# Altium schematic symbol library Sensor.SchLib: 53 symbols
Pins are listed as number, name and electrical type; pins without a type are passive.

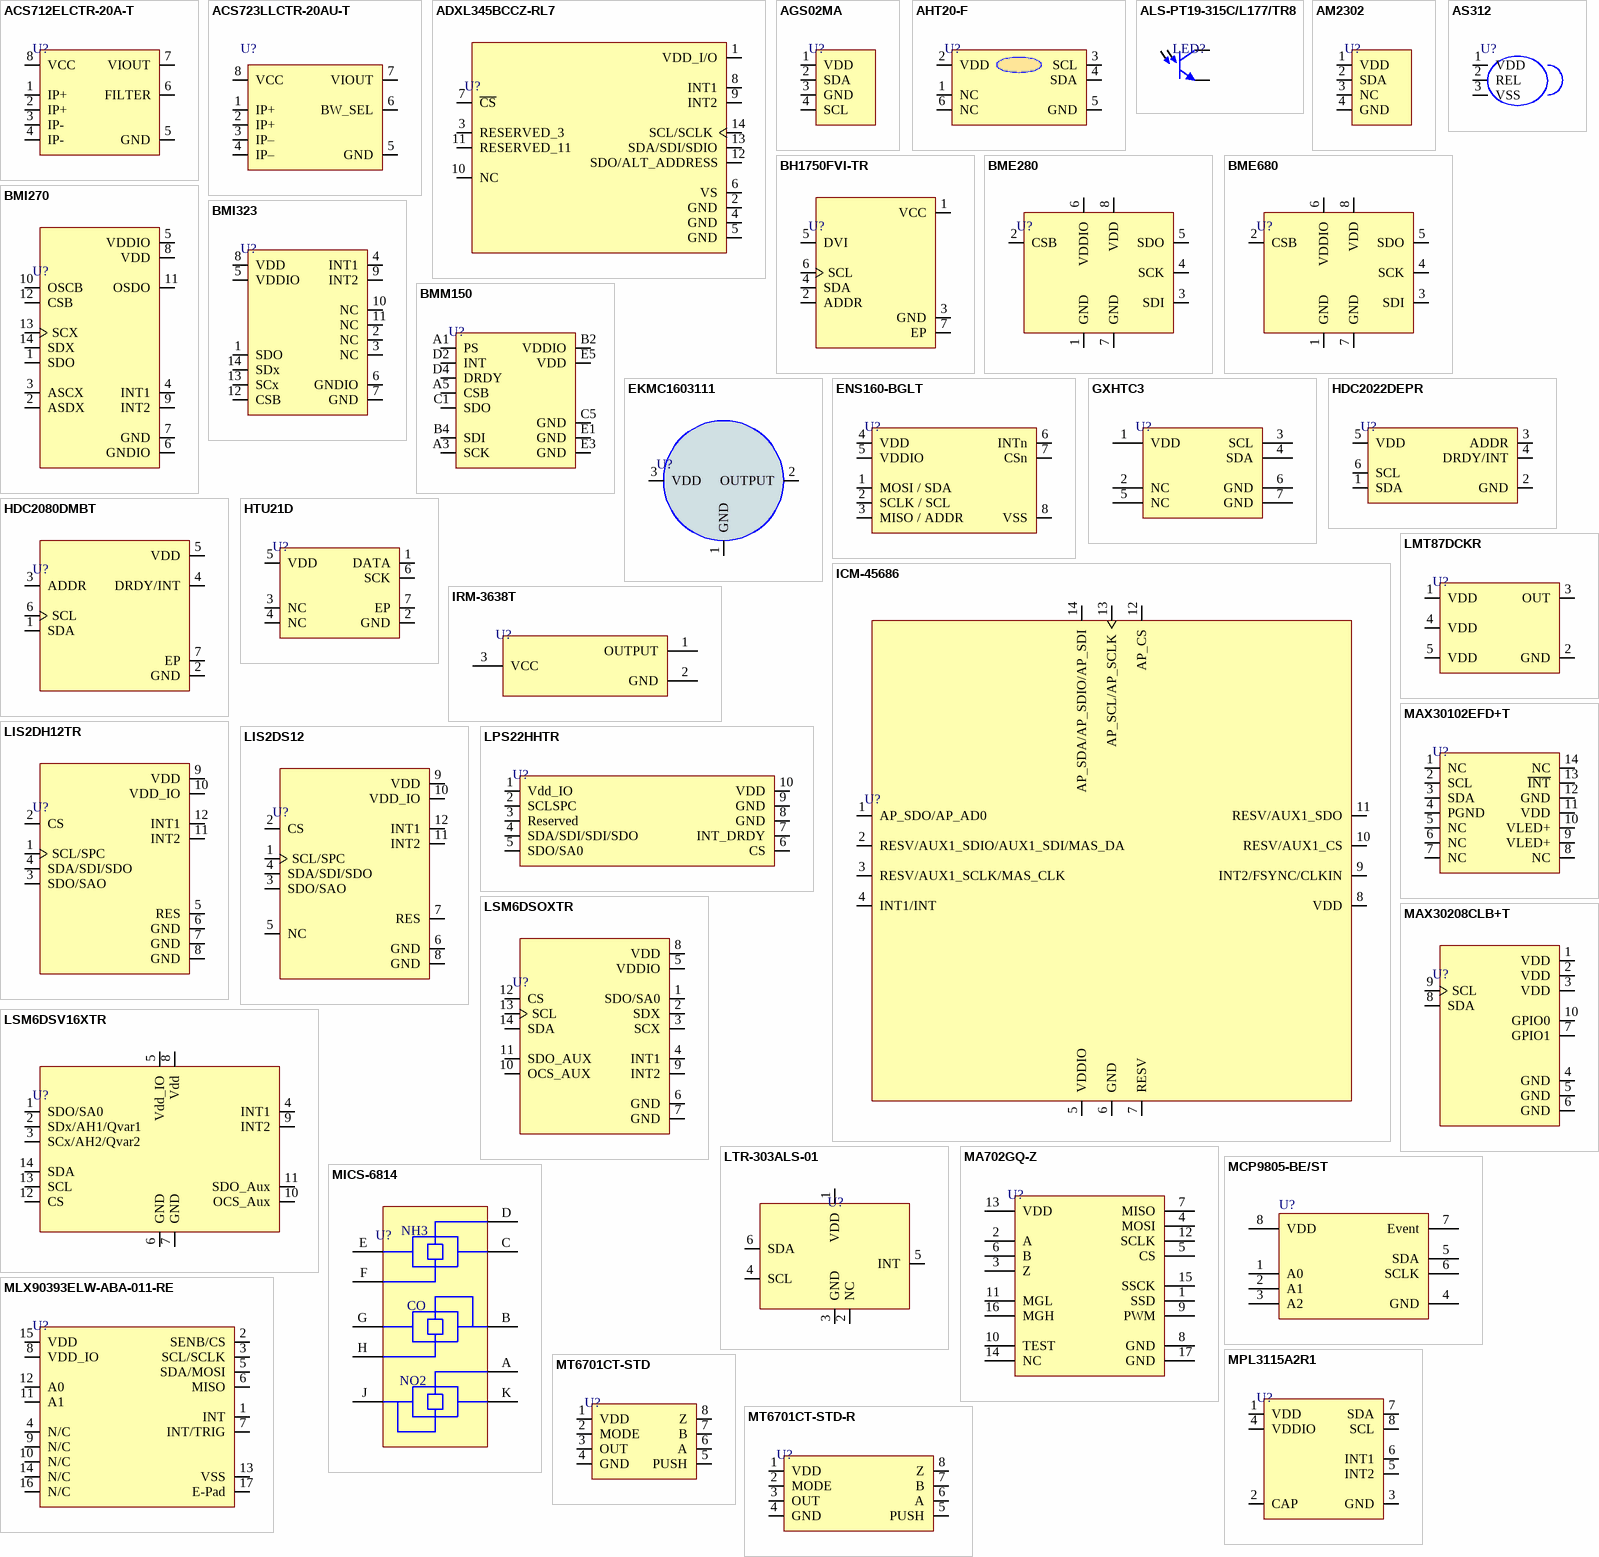
[diagram p0: symbols ACS712ELCTR-20A-T to MT6701CT-STD-R]

## ACS712ELCTR-20A-T
designator U?
SENSOR CURRENT HALL 20A AC/DC; Manufacturer: Allegro MicroSystems, LLC; Manufacturer Part Number: ACS712ELCTR-20A-T; Item Type: IC; Package: SOIC-8; LCSC Part Number: C10681; ComponentLink5URL: https://www.lcsc.com/product-detail/Current-Sensors_Allegro-MicroSystems-LLC-ACS712ELCTR-20A-T_C10681.html; ComponentLink5Description: LCSC
footprint SOIC-8
pins: 1 IP+, 2 IP+, 3 IP-, 4 IP-, 5 GND, 6 FILTER, 7 VIOUT, 8 VCC

## ACS723LLCTR-20AU-T
designator U?
SENSOR CURRENT HALL 20A DC; Manufacturer: Allegro MicroSystems, LLC; Manufacturer Part Number: ACS723LLCTR-20AU-T; Item Type: Current Sensor; Package: SOP-8; LCSC Part Number: C459324; ComponentLink4URL: https://www.lcsc.com/product-detail/Current-Sensors_Allegro-MicroSystems-span-style-background-color-ff0-LLC-span-ACS723LLCTR-20AU-T_C459324.html; ComponentLink4Description: LCSC
footprint SOP-8
pins: 1 IP+, 2 IP+, 3 IP–, 4 IP–, 5 GND, 6 BW_SEL, 7 VIOUT, 8 VCC

## ADXL345BCCZ-RL7
designator U?
ACCEL 2-16G I2C/SPI 14LGA; Manufacturer: Analog Devices; Manufacturer Part Number: ADXL345BCCZ-RL7; Item Type: Accelerometers; Supplier: Mouser; LCSC Part Number: C9667; RoHS: Yes; Stock: 17836; Pricing: 1=6.67, 10=5.76, 50=5.27, 100=5.09, 1000=4.59, 10000=4.59 (USD); ComponentLink1URL: https://datasheet.ciiva.com/15099/getdatasheetpartid-317342-15099703.pdf?src-supplier=Verical; ComponentLink1Description: https://datasheet.ciiva.com/15099/getdatasheetpartid-317342-15099703.pdf?src-supplier=Verical; ComponentLink2URL: https://datasheet.ciiva.com/3271/adxl345-ep-3271528.pdf?src-supplier=Avnet; ComponentLink2Description: https://datasheet.ciiva.com/3271/adxl345-ep-3271528.pdf?src-supplier=Avnet; ComponentLink3URL: https://datasheet.ciiva.com/2809/adxl345-2809853.pdf?src-supplier=Digikey; ComponentLink3Description: https://datasheet.ciiva.com/2809/adxl345-2809853.pdf?src-supplier=Digikey; ComponentLink4URL: https://datasheet.ciiva.com/2809/adxl345-2809854.pdf?src-supplier=Digikey; ComponentLink4Description: https://datasheet.ciiva.com/2809/adxl345-2809854.pdf?src-supplier=Digikey; ComponentLink5URL: https://datasheet.ciiva.com/2809/adxl345-2809855.pdf?src-supplier=Digikey; ComponentLink5Description: https://datasheet.ciiva.com/2809/adxl345-2809855.pdf?src-supplier=Digikey; ComponentLink6URL: https://datasheet.ciiva.com/3271/adxl345-ep-3271595.pdf?src-supplier=Avnet; ComponentLink6Description: https://datasheet.ciiva.com/3271/adxl345-ep-3271595.pdf?src-supplier=Avnet
footprint 14-LGA (3x5)
pins: 1 VDD_I/O, 2 GND, 3 RESERVED_3, 4 GND, 5 GND, 6 VS, 7 ~{CS}, 8 INT1, 9 INT2, 10 NC, 11 RESERVED_11, 12 SDO/ALT_ADDRESS, 13 SDA/SDI/SDIO, 14 SCL/SCLK

## AGS02MA
designator U?
SIP-4 Gas Sensors ROHS; Manufacturer: Aosong (Guangzhou) Elec; Manufacturer Part Number: AGS02MA; Item Type: Sensor; Package: SIP-4; LCSC Part Number: C3012633; ComponentLink1Description: LCSC; ComponentLink1URL: https://lcsc.com/product-detail/Gas-Sensors_Aosong-Guangzhou-Elec-AGS02MA_C3012633.html?s_z=n_AGS02MA%2520
footprint AGS02MA
pins: 1 VDD, 2 SDA, 3 GND, 4 SCL

## AHT20-F
designator U?
SMD-6P,3x3mm Temperature and Humidity Sensor ROHS; Manufacturer: Aosong (Guangzhou) Elec; Manufacturer Part Number: AHT20-F; Item Type: IC; Package: SMD-6P,3x3mm; LCSC Part Number: C3012622; ComponentLink1Description: LCSC; ComponentLink1URL: https://www.lcsc.com/product-detail/Temperature-and-Humidity-Sensor_Aosong-Guangzhou-Elec-AHT20-F_C3012622.html
footprint AHT20-F
pins: 1 NC, 2 VDD, 3 SCL, 4 SDA, 5 GND, 6 NC

## ALS-PT19-315C/L177/TR8
designator LED?
SENSOR PHOTO 630NM 2SMD; Manufacturer: Everlight; Manufacturer Part Number: ALS-PT19-315C/L177/TR8; Rise Time: 0.11ms; Fall Time: 0.22ms; Lens Style: Flat; Collector Emitter Breakdown Voltage: 5.5V; Polarity: NPN; Number of Elements: 1; Dark Current: 100nA; Item Type: Photo Sensor; Supplier 1: Digi-Key; RoHS: Yes; Category: Sensors; Stock 1: 41849; Pricing 1: 1=0.46000, 5=0.41800, 10=0.37100, 25=0.33200, 50=0.29180, 100=0.24880, 500=0.20576, 1000=0.17226 (USD); Mount: Surface Mount; Case/Package: SMD/SMT; Number of Pins: 2; Min Operating Temperature: -40°C; Max Operating Temperature: 85°C; Wavelength: 630nm; Packaging: Tape and Reel; Package Quantity: 1; Max Breakdown Voltage: 5.5V; Radiation Hardening: No; RoHS Compliant: Yes; ComponentLink1URL: https://datasheet.ciiva.com/12092/als-pt19-315c-l177-tr-datasheet-34741-12092024.pdf?src-supplier=Mouser; ComponentLink1Description: https://datasheet.ciiva.com/12092/als-pt19-315c-l177-tr-datasheet-34741-12092024.pdf?src-supplier=Mouser; ComponentLink2URL: https://datasheet.ciiva.com/4270/alspt19315cl177-tr8-1810-4270796.pdf?src-supplier=Arrow+Electronics; ComponentLink2Description: https://datasheet.ciiva.com/4270/alspt19315cl177-tr8-1810-4270796.pdf?src-supplier=Arrow+Electronics; Supplier Part Number 1: 1080-1244-1-ND; LCSC Part Number: C146233
footprint ALS-PT19-315C/L177/TR_
pins: 1 C, 2 E

## AM2302
designator U?
SIP-4 Temperature and Humidity Sensor ROHS; Manufacturer: Aosong (Guangzhou) Elec; Manufacturer Part Number: AM2302; Package: SIP-4; LCSC Part Number: C83988; Item Type: Sensor; ComponentLink1Description: LCSC; ComponentLink1URL: https://lcsc.com/product-detail/Temperature-and-Humidity-Sensor_Aosong-Guangzhou-Elec-AM2302_C83988.html?s_z=n_am2302
footprint AM2302
pins: 1 VDD, 2 SDA, 3 NC, 4 GND

## AS312
designator U?
Plugin Human Body Sensing Sensor ROHS; Manufacturer: Senba Sensing Tech; Manufacturer Part Number: AS312; Package: Plugin; LCSC Part Number: C90465; Item Type: Sensor; ComponentLink1Description: LCSC; ComponentLink1URL: https://lcsc.com/product-detail/Biometric-Sensors_Senba-Sensing-Tech-AS312_C90465.html
footprint AS312
pins: 1 VDD, 2 REL, 3 VSS

## BH1750FVI-TR
designator U?
SENSOR OPT 560NM AMBIENT 6WSOF; Manufacturer: Rohm; Manufacturer Part Number: BH1750FVI-TR; Item Type: IC; Min Supply Voltage: 2.7V; Max Supply Voltage: 3.6V; Interface: I2C,Serial; Max Power Dissipation: 260mW; Output Type: I2C,Digital,DIGITAL OUTPUT; Operating Supply Current: 120uA; Supplier: Digikey; LCSC Part Number: C78960; RoHS: Yes; Stock: 3772; Pricing: 1=3.29, 5=2.934, 10=2.804, 25=2.648, 50=2.542, 100=2.4447, 500=2.24896, 1000=2.18484 (USD); Mounting Technology: Surface Mount; Case/Package: SMD/SMT; Pins: 6; Contact Plating: Copper,Tin; Min Operating Temperature: -40°C; Max Operating Temperature: 85°C; Packaging: Tape and Reel; Package Quantity: 3000; Type: Integrated Circuit (IC); Wavelength: 560nm; Series: -; Length: 3mm; Width: 1.8mm; Height: 0.75mm; Lead Free: Lead Free; RoHS Compliant: Yes; Reach SVHC Compliant: Unknown; ComponentLink1URL: https://datasheet.ciiva.com/4697/bh1750fvi-e-186247-4697237.pdf?src-supplier=Mouser; ComponentLink1Description: https://datasheet.ciiva.com/4697/bh1750fvi-e-186247-4697237.pdf?src-supplier=Mouser; ComponentLink2URL: https://datasheet.ciiva.com/15098/getdatasheetpartid-451213-15098956.pdf?src-supplier=Verical; ComponentLink2Description: https://datasheet.ciiva.com/15098/getdatasheetpartid-451213-15098956.pdf?src-supplier=Verical; ComponentLink3URL: https://datasheet.ciiva.com/2819/bh1750fvi-e-2819308.pdf?src-supplier=Digikey; ComponentLink3Description: https://datasheet.ciiva.com/2819/bh1750fvi-e-2819308.pdf?src-supplier=Digikey; ComponentLink4URL: https://datasheet.ciiva.com/2819/bh1750fvi-e-2819309.pdf?src-supplier=Digikey; ComponentLink4Description: https://datasheet.ciiva.com/2819/bh1750fvi-e-2819309.pdf?src-supplier=Digikey; ComponentLink5URL: https://datasheet.ciiva.com/2819/bh1750fvi-e-2819310.pdf?src-supplier=Digikey; ComponentLink5Description: https://datasheet.ciiva.com/2819/bh1750fvi-e-2819310.pdf?src-supplier=Digikey
footprint 6-WSOF
pins: 1 VCC, 2 ADDR, 3 GND, 4 SDA, 5 DVI, 6 SCL, 7 EP

## BME280
designator U?
SENSOR PRESSURE HUMIDITY TEMP; Manufacturer: Bosch; Manufacturer Part Number: BME280; Item Type: Tem and Humidity Sensor; Supplier: Future Electronics; Supplier Part Number: 2053946; RoHS: No; Category: Temperature and Humidity Sensors; Stock: 9052; Pricing: 1=4.74, 20=4.31, 150=4.02, 1000=3.75, 5000=3.53 (USD); ComponentLink1URL: https://ae-bst.resource.bosch.com/media/_tech/media/product_flyer/BME280_Productflyer_BST_20170109.pdf?src-supplier=Arrow+Electronics; ComponentLink1Description: https://ae-bst.resource.bosch.com/media/_tech/media/product_flyer/BME280_Productflyer_BST_20170109.pdf?src-supplier=Arrow+Electronics; ComponentLink2URL: https://ae-bst.resource.bosch.com/media/_tech/media/datasheets/BST-BME280-DS002.pdf?src-supplier=Digi-Key; ComponentLink2Description: https://ae-bst.resource.bosch.com/media/_tech/media/datasheets/BST-BME280-DS002.pdf?src-supplier=Digi-Key; ComponentLink3URL: https://ae-bst.resource.bosch.com/media/_tech/media/product_flyer/BME280_Productflyer_BST_20170109.pdf?src-supplier=Mouser; ComponentLink3Description: https://ae-bst.resource.bosch.com/media/_tech/media/product_flyer/BME280_Productflyer_BST_20170109.pdf?src-supplier=Mouser; ComponentLink4URL: https://ae-bst.resource.bosch.com/media/_tech/media/product_flyer/BME280_Productflyer_BST_20170109.pdf?src-supplier=NAC+Semi; ComponentLink4Description: https://ae-bst.resource.bosch.com/media/_tech/media/product_flyer/BME280_Productflyer_BST_20170109.pdf?src-supplier=NAC+Semi; ComponentLink5URL: https://datasheet.octopart.com/BME280-Bosch-Sensortec-datasheet-119732019.pdf?src-supplier=LKR; ComponentLink5Description: https://datasheet.octopart.com/BME280-Bosch-Sensortec-datasheet-119732019.pdf?src-supplier=LKR; LCSC Part Number: C92489
footprint BME280
pins: 1 GND, 2 CSB, 3 SDI, 4 SCK, 5 SDO, 6 VDDIO, 7 GND, 8 VDD

## BME680
designator U?
SENSOR RH PRESSURE TEMP VOC; Manufacturer: Bosch Sensortec; Manufacturer Part Number: BME680; Sensor Type: Temperature; Output Type: SPI,I2C; Item Type: Temperature Sensor; Supplier 1: Future Electronics; RoHS: No; Category: Uncategorized; Stock 1: 64; Pricing 1: 1=9.84000, 20=8.81000, 125=8.18000, 500=7.71000, 3000=7.09000 (USD); Min Operating Temperature: -40°C; Max Operating Temperature: 85°C; ComponentLink1URL: https://ae-bst.resource.bosch.com/media/_tech/media/application_notes/BST-BME680-HS000-05.pdf?src-supplier=Digi-Key; ComponentLink1Description: https://ae-bst.resource.bosch.com/media/_tech/media/application_notes/BST-BME680-HS000-05.pdf?src-supplier=Digi-Key; ComponentLink2URL: https://ae-bst.resource.bosch.com/media/_tech/media/product_flyer/BST-BME680-FL000.pdf?src-supplier=Digi-Key; ComponentLink2Description: https://ae-bst.resource.bosch.com/media/_tech/media/product_flyer/BST-BME680-FL000.pdf?src-supplier=Digi-Key; Supplier Part Number 1: 7107186; LCSC Part Number: C125972
footprint BME680
pins: 1 GND, 2 CSB, 3 SDI, 4 SCK, 5 SDO, 6 VDDIO, 7 GND, 8 VDD

## BMI270
designator U?
IMU ACCEL/GYRO I2C/SPI 14LGA; Manufacturer: Bosch Sensortec; Manufacturer Part Number: BMI270; Item Type: Sensor; Supplier: Future Electronics; LCSC Part Number: C2836813; RoHS: No; Stock: 5000; Pricing: 1=4.43, 20=4, 100=3.77, 500=3.54, 2500=3.31 (USD)
footprint 14-LGA (2.5x3)
pins: 1 SDO, 2 ASDX, 3 ASCX, 4 INT1, 5 VDDIO, 6 GNDIO, 7 GND, 8 VDD, 9 INT2, 10 OSCB, 11 OSDO, 12 CSB, 13 SCX, 14 SDX

## BMI323
designator U?
IMU ACCEL/GYRO I2C/SPI 14LGA; Manufacturer: Bosch Sensortec; Manufacturer Part Number: BMI323; Item Type: IC; Supplier: Future Electronics; Supplier Part Number: 1168362; RoHS: No; Category: Uncategorized; LCSC Part Number: C5368700
footprint 14-LGA (2.5x3)
pins: 1 SDO, 2 NC, 3 NC, 4 INT1, 5 VDDIO, 6 GNDIO, 7 GND, 8 VDD, 9 INT2, 10 NC, 11 NC, 12 CSB, 13 SCx, 14 SDx

## BMM150
designator U?
SENSOR FLIPCORE/HALL SPI 12WLCSP; Manufacturer: Bosch Sensortec; Manufacturer Part Number: BMM150; Item Type: Magnetic Sensors; Supplier: Rs; Supplier Part Number: 2457371; RoHS: Yes; Category: Magnetic Sensors; Stock: 780; Pricing: 5=1.686, 25=1.598, 100=1.49, 500=1.37, 1000=1.262 (GBP); ComponentLink1URL: https://datasheet.ciiva.com/18575/bst-bmm150-ds001-01-18575453.pdf?src-supplier=Digi-Key; ComponentLink1Description: https://datasheet.ciiva.com/18575/bst-bmm150-ds001-01-18575453.pdf?src-supplier=Digi-Key; LCSC Part Number: C171681
footprint 12-WLCSP (1.56x1.56)
pins: A1 PS, A3 SCK, A5 CSB, B2 VDDIO, B4 SDI, C1 SDO, C5 GND, D2 INT, D4 DRDY, E1 GND, E3 GND, E5 VDD

## EKMC1603111
designator U?
PaPIRs MOTION SENSOR VZ series 170uA (White) 12m detection range; Manufacturer: Panasonic; Manufacturer Part Number: EKMC1603111; Supplier: Rs; Supplier Part Number: 1357081; RoHS: Yes; Category: Motion Sensors; Stock: 74; Pricing: 50=6.546, 250=5.46, 500=5.32 (GBP); ComponentLink1URL: https://datasheet.ciiva.com/1314/1537854-1314441.pdf?src-supplier=Element14; ComponentLink1Description: https://datasheet.ciiva.com/1314/1537854-1314441.pdf?src-supplier=Element14; ComponentLink2URL: https://datasheet.ciiva.com/1314/1537854-1314623.pdf?src-supplier=Element14; ComponentLink2Description: https://datasheet.ciiva.com/1314/1537854-1314623.pdf?src-supplier=Element14; ComponentLink3URL: https://datasheet.ciiva.com/24392/papirs-ekmc-catalog-24392999.pdf?src-supplier=Onlinecomponents.com; ComponentLink3Description: https://datasheet.ciiva.com/24392/papirs-ekmc-catalog-24392999.pdf?src-supplier=Onlinecomponents.com
footprint EKMC1603111
pins: 1 GND (power), 2 OUTPUT (oc), 3 VDD (power)

## ENS160-BGLT
designator U?
Digital Metal-Oxide Multi-Gas Sensor; Manufacturer: ScioSense; Manufacturer Part Number: ENS160-BGLT; Supplier 1: Mouser; RoHS: No; Category: Uncategorized; Stock 1: 5978; Pricing 1: 1=12.8, 10=10.46, 50=9.67, 100=8.1, 1000=7.19, 10000=7.19 (USD); Supplier Part Number 1: 135-ENS160-BGLT; LCSC Part Number: C3659333; Item Type: Gas Sensor
footprint ENS160-BGLT
pins: 1 MOSI / SDA, 2 SCLK / SCL, 3 MISO / ADDR, 4 VDD, 5 VDDIO, 6 INTn, 7 CSn, 8 VSS

## GXHTC3
designator U?
DFN-6-EP(2x2) Temperature and Humidity Sensor ROHS; Manufacturer: GXCAS; Manufacturer Part Number: GXHTC3; Item Type: Temperature & Humidity Sensor; Package: DFN-6-EP(2x2); LCSC Part Number: C2837688; ComponentLink1Description: LCSC; ComponentLink1URL: https://www.lcsc.com/product-detail/Temperature-and-Humidity-Sensor_GXCAS-GXHTC3_C2837688.html
footprint DFN-6-EP(2x2)
pins: 1 VDD, 2 NC, 3 SCL, 4 SDA, 5 NC, 6 GND, 7 GND

## HDC2022DEPR
designator U?
SENSOR MULT HUMIDITY/TEMP; Manufacturer: Texas Instruments; Manufacturer Part Number: HDC2022DEPR; Item Type: Multifunction Sensor; Supplier: Mouser; Supplier Part Number: 595-HDC2022DEPR; RoHS: Yes; Category: Integrated Circuits (ICs); Stock: 5312; Pricing: 1=4.2, 10=2.66, 50=2.66, 100=2.58, 1000=2.02, 10000=1.94 (USD)
footprint HDC2022DEPR
pins: 1 SDA, 2 GND, 3 ADDR, 4 DRDY/INT, 5 VDD, 6 SCL

## HDC2080DMBT
designator U?
HUMIDITY SENSOR; Manufacturer: Texas Instruments; Manufacturer Part Number: HDC2080DMBT; Item Type: Temperature and Humidity Sensor; Supplier: Mouser; Supplier Part Number: 595-HDC2080DMBT; RoHS: Yes; Category: Integrated Circuits (ICs); Stock: 8942; Pricing: 1=4.78, 10=3.59, 50=3.59, 100=2.92, 1000=2.28, 10000=2.21 (USD); ComponentLink1URL: http://www.ti.com/general/docs/suppproductinfo.tsp?distId=10&amp;gotoUrl=http%3A%2F%2Fwww.ti.com%2Flit%2Fgpn%2Fhdc2080&src-supplier=Digi-Key; ComponentLink1Description: http://www.ti.com/general/docs/suppproductinfo.tsp?distId=10&amp;gotoUrl=http%3A%2F%2Fwww.ti.com%2Flit%2Fgpn%2Fhdc2080&src-supplier=Digi-Key; ComponentLink2URL: http://www.ti.com/lit/ds/symlink/hdc2080.pdf?src-supplier=Digi-Key; ComponentLink2Description: http://www.ti.com/lit/ds/symlink/hdc2080.pdf?src-supplier=Digi-Key; LCSC Part Number: C266121
footprint HDC2080DMBT (DFN-6(3x3))
pins: 1 SDA, 2 GND, 3 ADDR, 4 DRDY/INT, 5 VDD, 6 SCL, 7 EP

## HTU21D
designator U?
DFN-6-EP(3x3) Temperature and Humidity Sensor ROHS; Manufacturer: TE Connectivity; Manufacturer Part Number: HTU21D; Item Type: IC; Supplier: Mouser; Supplier Part Number: 824-HTU21D; RoHS: Yes; Category: Temperature and Humidity Sensors; Stock: 15840; Pricing: 1=8.23, 10=5.36, 50=5.36, 100=4.48, 400=3.75, 800=3.5, 1000=3.5, 2400=3.38, 4800=3.26, 10000=3.21, 24800=3.14 (USD); ComponentLink1URL: http://www.farnell.com/datasheets/2207166.pdf?src-supplier=Farnell; ComponentLink1Description: http://www.farnell.com/datasheets/2207166.pdf?src-supplier=Farnell; ComponentLink2URL: https://datasheet.octopart.com/HTU21D-TE-Connectivity-datasheet-22149496.pdf?src-supplier=Farnell; ComponentLink2Description: https://datasheet.octopart.com/HTU21D-TE-Connectivity-datasheet-22149496.pdf?src-supplier=Farnell; ComponentLink3URL: https://datasheet.octopart.com/HTU21D-TE-Connectivity-datasheet-65793082.pdf?src-supplier=Element14; ComponentLink3Description: https://datasheet.octopart.com/HTU21D-TE-Connectivity-datasheet-65793082.pdf?src-supplier=Element14; ComponentLink4URL: https://datasheet.octopart.com/HTU21D-TE-Connectivity-datasheet-41524056.pdf?src-supplier=Newark; ComponentLink4Description: https://datasheet.octopart.com/HTU21D-TE-Connectivity-datasheet-41524056.pdf?src-supplier=Newark; LCSC Part Number: C83479
footprint DFN-6-EP(3x3)
pins: 1 DATA, 2 GND, 3 NC, 4 NC, 5 VDD, 6 SCK, 7 EP

## ICM-45686
designator U?
6 AXIS MEMES SENSOR; Manufacturer: TDK InvenSense; Manufacturer Part Number: ICM-45686; Item Type: IC; Supplier: Digikey; LCSC Part Number: C22459454; RoHS: No; Stock: 19377; Pricing: 1=5.86, 5=5.27, 10=5.052, 25=4.7908, 50=4.6122, 100=4.4484, 500=4.11884, 1000=3.99605 (USD)
footprint LGA-14(3x2.5)
pins: 1 AP_SDO/AP_AD0, 2 RESV/AUX1_SDIO/AUX1_SDI/MAS_DA, 3 RESV/AUX1_SCLK/MAS_CLK, 4 INT1/INT, 5 VDDIO, 6 GND, 7 RESV, 8 VDD, 9 INT2/FSYNC/CLKIN, 10 RESV/AUX1_CS, 11 RESV/AUX1_SDO, 12 AP_CS, 13 AP_SCL/AP_SCLK, 14 AP_SDA/AP_SDIO/AP_SDI

## IRM-3638T
designator U?
SENSOR REMOTE REC 38.0KHZ 14M; Manufacturer: Everlight; Manufacturer Part Number: IRM-3638T; Operating Supply Current: 1mA; Min Output Voltage: 2.7V; Operating Supply Voltage: 5.5V; Item Type: Optical Sensor; Supplier 1: Future Electronics; RoHS: Yes; Category: Optical Sensors; Pricing 1: 250=0.20500, 1500=0.19700, 5000=0.19000, 10000=0.18600, 20000=0.18000 (USD); Mount: Through Hole; Case/Package: Module; Number of Pins: 3; Min Operating Temperature: -25°C; Max Operating Temperature: 80°C; Package Quantity: 250; Series: -; Sensing Distance: 14m; Orientation: Side View; RoHS Compliant: Yes; ComponentLink1URL: https://datasheet.ciiva.com/12418/irm-3636t-27149-12418050.pdf?src-supplier=Mouser; ComponentLink1Description: https://datasheet.ciiva.com/12418/irm-3636t-27149-12418050.pdf?src-supplier=Mouser; ComponentLink2URL: https://datasheet.ciiva.com/2821/irm-36xxt-series-2821351.pdf?src-supplier=Digi-Key; ComponentLink2Description: https://datasheet.ciiva.com/2821/irm-36xxt-series-2821351.pdf?src-supplier=Digi-Key; LCSC Part Number: C16216; Supplier Part Number 1: 2052908
footprint SIP-3P-2.54mm
pins: 1 OUTPUT, 2 GND, 3 VCC

## LIS2DH12TR
designator U?
ACCEL 2-16G I2C/SPI 12LGA; Manufacturer: STMicroelectronics; Manufacturer Part Number: LIS2DH12TR; Item Type: Sensor; Operating Supply Voltage: 2.5V; Supplier: Future Electronics; LCSC Part Number: C110926; RoHS: Yes; Stock: 64000; Pricing: 8000=0.9 (USD); Lead Free: 5697LeadFree; ComponentLink1URL: https://datasheet.ciiva.com/46423/1836729-46423946.pdf?src-supplier=Element14; ComponentLink1Description: https://datasheet.ciiva.com/46423/1836729-46423946.pdf?src-supplier=Element14
footprint 12-LGA (2x2)
pins: 1 SCL/SPC, 2 CS, 3 SDO/SAO, 4 SDA/SDI/SDO, 5 RES, 6 GND, 7 GND, 8 GND, 9 VDD, 10 VDD_IO, 11 INT2, 12 INT1

## LIS2DS12
designator U?
ACCEL 2-16G I2C/SPI 12LGA; Manufacturer: STMicroelectronics; Manufacturer Part Number: LIS2DS12; Item Type: Accelerometers; Supplier: Avnet; LCSC Part Number: C5337244; RoHS: Yes; Stock: 1431; Pricing: 1=1.9, 10=1.61, 100=1.29, 500=1.2, 1000=1.07 (USD); ComponentLink1URL: http://www.farnell.com/datasheets/2028148.pdf?src-supplier=Farnell; ComponentLink1Description: http://www.farnell.com/datasheets/2028148.pdf?src-supplier=Farnell; ComponentLink2URL: https://datasheet.octopart.com/LIS2DS12-STMicroelectronics-datasheet-62333086.pdf?src-supplier=Element14; ComponentLink2Description: https://datasheet.octopart.com/LIS2DS12-STMicroelectronics-datasheet-62333086.pdf?src-supplier=Element14; ComponentLink3URL: http://www.farnell.com/datasheets/2028148.pdf?src-supplier=Newark; ComponentLink3Description: http://www.farnell.com/datasheets/2028148.pdf?src-supplier=Newark
footprint 12-LGA (2x2)
pins: 1 SCL/SPC, 2 CS, 3 SDO/SAO, 4 SDA/SDI/SDO, 5 NC, 6 GND, 7 RES, 8 GND, 9 VDD, 10 VDD_IO, 11 INT2, 12 INT1

## LMT87DCKR
designator U?
SENSOR ANALOG -50C-150C SC70-5; Manufacturer: Texas Instruments; Manufacturer Part Number: LMT87DCKR; Item Type: IC; Supplier: Mouser; LCSC Part Number: C962065; RoHS: Yes; Stock: 11565; Pricing: 1=0.5, 10=0.389, 50=0.389, 100=0.36, 1000=0.278, 10000=0.205 (USD); ComponentLink1URL: https://datasheet.ciiva.com/15098/getdatasheetpartid-716720-15098830.pdf?src-supplier=Verical; ComponentLink1Description: https://datasheet.ciiva.com/15098/getdatasheetpartid-716720-15098830.pdf?src-supplier=Verical; ComponentLink2URL: https://datasheet.ciiva.com/18575/lmt87-18575334.pdf?src-supplier=Digikey; ComponentLink2Description: https://datasheet.ciiva.com/18575/lmt87-18575334.pdf?src-supplier=Digikey
footprint SC70-5
pins: 1 VDD, 2 GND, 3 OUT, 4 VDD, 5 VDD

## LPS22HHTR
designator U?
SENSOR 18.27PSIA 24BIT 10HLGA; Manufacturer: STMicroelectronics; Manufacturer Part Number: LPS22HHTR; Item Type: Pressure Sensors; Output Type: SPI,I2C; Pressure Type: Absolute; Port Style: No Port; Max Pressure: 290PSI; Max Supply Voltage: 3.7V; Min Supply Voltage: 1.7V; Supplier: Mouser; LCSC Part Number: C2827824; RoHS: Yes; Stock: 8715; Pricing: 1=2.49, 10=2, 50=1.91, 100=1.84, 1000=1.63, 10000=1.49 (USD); Case/Package: HLGA; Pins: 10; Min Operating Temperature: -40°C; Max Operating Temperature: 85°C; Termination: SMD/SMT; Series: -; Packaging: Cut Tape; Operating Pressure: 18.27PSI; Height: 800um; RoHS Compliant: Yes; ComponentLink1URL: http://www.farnell.com/datasheets/2710908.pdf?src-supplier=Farnell; ComponentLink1Description: http://www.farnell.com/datasheets/2710908.pdf?src-supplier=Farnell; ComponentLink2URL: http://www.farnell.com/datasheets/2710908.pdf?src-supplier=Newark; ComponentLink2Description: http://www.farnell.com/datasheets/2710908.pdf?src-supplier=Newark; ComponentLink3URL: https://www.st.com/resource/en/datasheet/lps22hh.pdf?src-supplier=Digikey; ComponentLink3Description: https://www.st.com/resource/en/datasheet/lps22hh.pdf?src-supplier=Digikey; ComponentLink4URL: https://www.st.com/resource/en/data_brief/lps22hh.pdf?src-supplier=Digikey; ComponentLink4Description: https://www.st.com/resource/en/data_brief/lps22hh.pdf?src-supplier=Digikey
footprint HLGA-10(2x2)
pins: 1 Vdd_IO, 2 SCLSPC, 3 Reserved, 4 SDA/SDI/SDI/SDO, 5 SDO/SA0, 6 CS, 7 INT_DRDY, 8 GND, 9 GND, 10 VDD

## LSM6DSOXTR
designator U?
INEMO INERTIAL MODULE: 3D ACCELE; Manufacturer: STMicroelectronics; Manufacturer Part Number: LSM6DSOXTR; Item Type: IC; Sensor Type: Accelerometer,Gyroscope,6 Axis; Output Type: SPI,I2C; Max Supply Voltage: 3.6V; Min Supply Voltage: 1.62V; Operating Supply Current: 550uA; Operating Supply Voltage: 1.8V; Supplier: Mouser; LCSC Part Number: C481766; RoHS: Yes; Stock: 1151; Pricing: 1=4.21, 10=3.61, 50=3.28, 100=3.16, 1000=2.84, 10000=2.64 (USD); Mounting Technology: Surface Mount; Case/Package: LGA; Min Operating Temperature: -40°C; Max Operating Temperature: 85°C; Series: iNEMO; Packaging: Cut Tape; Height: 860um; ComponentLink1URL: http://www.farnell.com/datasheets/2736724.pdf?src-supplier=Farnell; ComponentLink1Description: http://www.farnell.com/datasheets/2736724.pdf?src-supplier=Farnell; ComponentLink2URL: https://www.st.com/resource/en/datasheet/lsm6dsox.pdf?src-supplier=Digikey; ComponentLink2Description: https://www.st.com/resource/en/datasheet/lsm6dsox.pdf?src-supplier=Digikey; ComponentLink3URL: http://www.farnell.com/datasheets/2736724.pdf?src-supplier=Element14; ComponentLink3Description: http://www.farnell.com/datasheets/2736724.pdf?src-supplier=Element14; ComponentLink4URL: http://www.farnell.com/datasheets/2736724.pdf?src-supplier=Newark; ComponentLink4Description: http://www.farnell.com/datasheets/2736724.pdf?src-supplier=Newark
footprint 14-LGA (2.5x3)
pins: 1 SDO/SA0, 2 SDX, 3 SCX, 4 INT1, 5 VDDIO, 6 GND, 7 GND, 8 VDD, 9 INT2, 10 OCS_AUX, 11 SDO_AUX, 12 CS, 13 SCL, 14 SDA

## LSM6DSV16XTR
designator U?
INEMO 3D ACCELEROMETER AND 3D GY; Manufacturer: STMicroelectronics; Manufacturer Part Number: LSM6DSV16XTR; Item Type: IC; Max Supply Voltage: 3.6V; Min Supply Voltage: 1.71V; Supplier: Arrow Electronics; LCSC Part Number: C5267406; RoHS: No; Stock: 5000; Pricing: 5000=2.815 (USD); Min Operating Temperature: -40°C; Max Operating Temperature: 85°C; Height: 860um
footprint 14-LGA (2.5x3)
pins: 1 SDO/SA0, 2 SDx/AH1/Qvar1, 3 SCx/AH2/Qvar2, 4 INT1, 5 Vdd_IO, 6 GND, 7 GND, 8 Vdd, 9 INT2, 10 OCS_Aux, 11 SDO_Aux, 12 CS, 13 SCL, 14 SDA

## LTR-303ALS-01
designator U?
SENSOR OPT AMBIENT 6DFN; Manufacturer: Vishay Lite-On; Manufacturer Part Number: LTR-303ALS-01; Output Type: I2C; Item Type: Ambient Light Sensor; Supplier 1: Arrow Electronics; RoHS: Yes; Category: Uncategorized; Stock 1: 1717; Pricing 1: 1=0.5742, 10=0.465, 25=0.4604, 100=0.394, 250=0.39, 500=0.3741, 1000=0.3355 (USD); Mounting Technology: Surface Mount; Case/Package: DFN; Pins: 6; Min Operating Temperature: -30°C; Max Operating Temperature: 70°C; Packaging: Cut Tape; Series: -; RoHS Compliant: Yes; ComponentLink1URL: http://optoelectronics.liteon.com/upload/download/DS86-2013-0004/LTR-303ALS-01_DS_V1.pdf?src-supplier=Digi-Key; ComponentLink1Description: http://optoelectronics.liteon.com/upload/download/DS86-2013-0004/LTR-303ALS-01_DS_V1.pdf?src-supplier=Digi-Key; ComponentLink2URL: http://optoelectronics.liteon.com/upload/download/DS86-2013-0004/P_100_LTR-303ALS-01%20DS.pdf?src-supplier=Avnet; ComponentLink2Description: http://optoelectronics.liteon.com/upload/download/DS86-2013-0004/P_100_LTR-303ALS-01%20DS.pdf?src-supplier=Avnet; Supplier Part Number 1: LTR-303ALS-01; LCSC Part Number: C364577
footprint 6-Pin ChipLED (SENSOR OPT AMBIENT 6DFN)
pins: 1 VDD, 2 NC, 3 GND, 4 SCL, 5 INT, 6 SDA

## MA702GQ-Z
designator U?
SENSOR ANGLE SMD; Manufacturer: Monolithic Power Systems; Manufacturer Part Number: MA702GQ-Z; Sensing Method: Hall Effect; Frequency: 26MHz; Frequency Stability: 10ppm; Max Supply Current: 7mA; Item Type: Position Sensor; Supplier 1: Avnet; RoHS: Yes; Stock 1: 110000; Pricing 1: 5000=3.15000, 10000=2.97500, 20000=2.80000, 30000=2.62500, 40000=2.45000 (USD); Mount: Surface Mount; Case/Package: QFN; Min Operating Temperature: -40°C; Max Operating Temperature: 85°C; Packaging: Tape and Reel; Termination: SMD/SMT; RoHS Compliant: Yes; ComponentLink1URL: https://www.monolithicpower.com/pub/media/document/m/a/ma702_r1.0.pdf?src-supplier=Digi-Key; ComponentLink1Description: https://www.monolithicpower.com/pub/media/document/m/a/ma702_r1.0.pdf?src-supplier=Digi-Key; Supplier Part Number 1: MA702GQ-Z
footprint 16-QFN (3x3).
pins: 1 SSD, 2 A, 3 Z, 4 MOSI, 5 CS, 6 B, 7 MISO, 8 GND, 9 PWM, 10 TEST, 11 MGL, 12 SCLK, 13 VDD, 14 NC, 15 SSCK, 16 MGH, 17 GND

## MAX30102EFD+T
designator U?
SENSOR OXIMETER/HEART RATE I2C; Manufacturer: Maxim; Manufacturer Part Number: MAX30102EFD+T; Item Type: Heart Rate Sensor; Supplier: Mouser; Supplier Part Number: 700-MAX30102EFD+T; RoHS: Yes; Category: Sensors; Stock: 7965; Pricing: 1=12.43, 10=9.84, 50=9.32, 100=7.95, 1000=7.05, 10000=6.66 (USD); Min Operating Temperature: -40°C; Max Operating Temperature: 85°C; Output Type: I2C; Series: -; Packaging: Cut Tape; RoHS Compliant: Yes; ComponentLink1URL: https://datasheets.maximintegrated.com/en/ds/MAX30102.pdf?src-supplier=Digi-Key; ComponentLink1Description: https://datasheets.maximintegrated.com/en/ds/MAX30102.pdf?src-supplier=Digi-Key; LCSC Part Number: C6454833
footprint MAX30102EFD+T
pins: 1 NC, 2 SCL, 3 SDA, 4 PGND, 5 NC, 6 NC, 7 NC, 8 NC, 9 VLED+, 10 VLED+, 11 VDD, 12 GND, 13 ~{INT}, 14 NC

## MAX30208CLB+T
designator U?
IC TEMP SENSOR; Manufacturer: Maxim; Manufacturer Part Number: MAX30208CLB+T; Supplier: Mouser; LCSC Part Number: C2874216; RoHS: Yes; Item Type: IC; Stock: 13529; Pricing: 1=3.98, 10=3.71, 50=3.16, 100=2.94, 1000=2.32, 10000=2.07 (USD)
footprint 10-LGA (2x2)
pins: 1 VDD, 2 VDD, 3 VDD, 4 GND, 5 GND, 6 GND, 7 GPIO1, 8 SDA, 9 SCL, 10 GPIO0

## MCP9805-BE/ST
designator U?
IC SENSOR THERMAL 3.0V 8TSSOP; Manufacturer: Microchip; Manufacturer Part Number: MCP9805-BE/ST; Min Supply Voltage: 3V; Max Supply Voltage: 3.6V; Output Current: 1uA; Interface: I2C,SMBus,2-Wire,Serial; Resolution: 10b; Operating Supply Current: 200uA; Accuracy: 2%; Number of Bits: 10; Output Type: I2C,Digital; Sensor Type: Temperature; Sensing Method: Resistive; ComponentLink1URL: https://datasheet.ciiva.com/22737/1678782-22737270.pdf?src-supplier=Element14; ComponentLink1Description: https://datasheet.ciiva.com/22737/1678782-22737270.pdf?src-supplier=Element14; ComponentLink2URL: https://datasheet.ciiva.com/43467/1678782-43467032.pdf?src-supplier=Farnell; ComponentLink2Description: https://datasheet.ciiva.com/43467/1678782-43467032.pdf?src-supplier=Farnell; ComponentLink3URL: https://datasheet.ciiva.com/22673/1678782-22673662.pdf?src-supplier=Element14; ComponentLink3Description: https://datasheet.ciiva.com/22673/1678782-22673662.pdf?src-supplier=Element14; Supplier 1: Digi-Key; RoHS: Yes; Category: Power Management ICs; Stock 1: 667; Pricing 1: 1=0.85000, 25=0.71000, 100=0.65000 (USD); Mount: Surface Mount; Case/Package: TSSOP; Number of Pins: 8; Min Operating Temperature: -40°C; Max Operating Temperature: 125°C; Package Quantity: 100; Packaging: Rail/Tube; Max Supply Voltage (DC): 3.6V; Min Supply Voltage (DC): 3V; Termination: SMD/SMT; Length: 3mm; Width: 4.4mm; Height: 1mm; Radiation Hardening: No; REACH SVHC: No SVHC; Lead Free: Lead Free; RoHS Compliant: Yes; ComponentLink4URL: https://datasheet.ciiva.com/1514/1791047-1514016.pdf?src-supplier=Element14; ComponentLink4Description: https://datasheet.ciiva.com/1514/1791047-1514016.pdf?src-supplier=Element14; ComponentLink5URL: https://datasheet.ciiva.com/2003/21977b-2003478.pdf?src-supplier=Digi-Key; ComponentLink5Description: https://datasheet.ciiva.com/2003/21977b-2003478.pdf?src-supplier=Digi-Key; ComponentLink6URL: https://datasheet.ciiva.com/5299/21977b-77986-5299688.pdf?src-supplier=Mouser; ComponentLink6Description: https://datasheet.ciiva.com/5299/21977b-77986-5299688.pdf?src-supplier=Mouser; ComponentLink7URL: https://datasheet.ciiva.com/3279/21977b-3279902.pdf?src-supplier=Avnet; ComponentLink7Description: https://datasheet.ciiva.com/3279/21977b-3279902.pdf?src-supplier=Avnet; Supplier Part Number 1: MCP9805-BE/ST-ND; LCSC Part Number: C636441; Item Type: IC
footprint 8-TSSOP (IC SENSOR THERMAL 3.0V 8TSSOP)
pins: 1 A0, 2 A1, 3 A2, 4 GND, 5 SDA, 6 SCLK, 7 Event, 8 VDD

## MICS-6814
designator U?
CO/NO2/NH3 Triple Gas Sensor Metaloxide Gas Detection Sensor SMD T/R; Manufacturer: Amphenol; Item Type: (CO) Sensor; Supplier 1: Arrow Electronics; Manufacturer Part Number: MICS-6814; RoHS: No; Category: Sensors; Stock 1: 100; Pricing 1: 1=10.8025, 10=10.7911 (USD); Supplier Part Number 1: MICS-6814; LCSC Part Number: C3659383
footprint MICS-6814
pins: A Rs2, B Rh1 RED/Rs1 RED, C Rh1 NH3, D Rs1 NH3, E Rh2 NH3, F Rs2 NH3, G Rh2 RED, H Rs2 RED, J Rh1 OX/Rs1 OX, K Rh2 OX
text: NH3; CO; NO2

## MLX90393ELW-ABA-011-RE
designator U?
SENSOR HALL I2C/SPI 16QFN; Manufacturer: Melexis; Manufacturer Part Number: MLX90393ELW-ABA-011-RE; Item Type: IC; Package: QFN-16-EP(3x3); LCSC Part Number: C2654971; ComponentLink1Description: LCSC; ComponentLink1URL: https://jlcpcb.com/partdetail/Melexis-MLX90393ELW_ABA_011RE/C2654971
footprint 16-QFN (3x3).
pins: 1 INT, 2 SENB/CS, 3 SCL/SCLK, 4 N/C, 5 SDA/MOSI, 6 MISO, 7 INT/TRIG, 8 VDD_IO, 9 N/C, 10 N/C, 11 A1, 12 A0, 13 VSS, 14 N/C, 15 VDD, 16 N/C, 17 E-Pad

## MPL3115A2R1
designator U?
SENSOR 15.95PSIA 24BIT 8LGA; Manufacturer: NXP Semicon; Manufacturer Part Number: MPL3115A2R1; Item Type: IC; Package: LGA-8(3x5); LCSC Part Number: C54429; ComponentLink1Description: LCSC; ComponentLink1URL: https://www.lcsc.com/product-detail/Pressure-Sensors_NXP-Semicon-MPL3115A2R1_C54429.html
footprint LGA-8(3x5)
pins: 1 VDD, 2 CAP, 3 GND, 4 VDDIO, 5 INT2, 6 INT1, 7 SDA, 8 SCL

## MT6701CT-STD
designator U?
SOP-8 Position Sensors ROHS; Manufacturer: Magn Tek; Manufacturer Part Number: MT6701CT-STD; Item Type: Sensor; Package: SOP-8; LCSC Part Number: C5451785; ComponentLink1Description: LCSC; ComponentLink1URL: https://www.lcsc.com/product-detail/Position-Sensors_Magn-Tek-MT6701CT-STD_C5451785.html?s_z=n_mt6701ct
footprint SOP-8
pins: 1 VDD, 2 MODE, 3 OUT, 4 GND, 5 PUSH, 6 A, 7 B, 8 Z

## MT6701CT-STD-R
designator U?
SOP-8 Position Sensor ROHS; Manufacturer: Magn Tek; Manufacturer Part Number: MT6701CT-STD-R; Item Type: IC; Package: SOP-8; ComponentLink1Description: LCSC; ComponentLink1URL: https://www.lcsc.com/product-detail/Position-Sensor_Magn-Tek-MT6701CT-STD-R_C3003196.html; LCSC Part Number: C3003196
footprint SOP-8
pins: 1 VDD, 2 MODE, 3 OUT, 4 GND, 5 PUSH, 6 A, 7 B, 8 Z

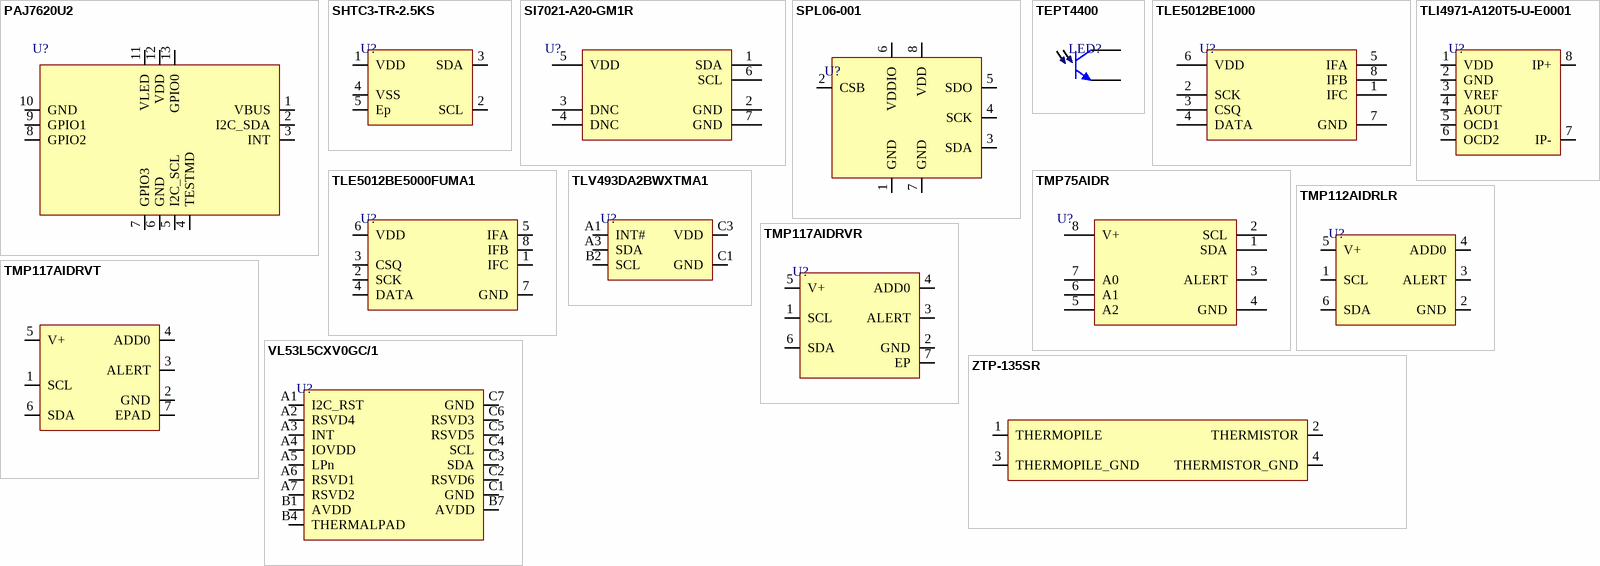
[diagram p1: symbols PAJ7620U2 to ZTP-135SR]

## PAJ7620U2
designator U?
Integrated Gesture Recognition Sensor with I2C Interface; Manufacturer: PixART Imaging Inc.; Manufacturer Part Number: PAJ7620U2; Item Type: IC; Package: *
footprint PAJ7620U2
pins: 1 VBUS, 2 I2C_SDA, 3 INT, 4 TESTMD, 5 I2C_SCL, 6 GND, 7 GPIO3, 8 GPIO2, 9 GPIO1, 10 GND, 11 VLED, 12 VDD, 13 GPIO0

## SHTC3-TR-2.5KS
designator U?
SHTC3 Series Digital ±2% RH SMT Humidity Temperature Sensor - DFN-8; Manufacturer: Sensirion; Manufacturer Part Number: SHTC3-TR-2.5KS; Item Type: IC; Supplier: Digikey; LCSC Part Number: C194656; RoHS: No; Stock: 21685; Pricing: 1=2.72, 5=2.292, 10=2.129, 25=1.932, 50=1.7952, 100=1.6682, 500=1.40712, 1000=1.30776 (USD); ComponentLink1URL: https://datasheet.octopart.com/SHTC3-TR-2.5KS-Sensirion-datasheet-166628637.pdf?src-supplier=Future+Electronics; ComponentLink1Description: https://datasheet.octopart.com/SHTC3-TR-2.5KS-Sensirion-datasheet-166628637.pdf?src-supplier=Future+Electronics
footprint 4-WDFN Exposed Pad
pins: 1 VDD, 2 SCL, 3 SDA, 4 VSS, 5 Ep

## SI7021-A20-GM1R
designator U?
SENS HUMID/TEMP 3.6V I2C 2% 6DFN; Manufacturer: Silicon Labs; Manufacturer Part Number: SI7021-A20-GM1R; Response Time: 18s; Accuracy: 3%; Sensor Type: Temperature; Output Type: I2C,Digital; Supplier 1: Digi-Key; Stock 1: 8770; Pricing 1: 1=3.37, 25=3.2436, 100=3.2313 (USD); Mount: Surface Mount; Min Operating Temperature: -40°C; Max Operating Temperature: 85°C; ComponentLink1URL: https://www.silabs.com/Support%20Documents/TechnicalDocs/Si7021-A20.pdf?src-supplier=Avnet; ComponentLink1Description: https://www.silabs.com/Support%20Documents/TechnicalDocs/Si7021-A20.pdf?src-supplier=Avnet; ComponentLink2URL: https://www.silabs.com/documents/public/data-sheets/Si7021-A20.pdf?src-supplier=Newark; ComponentLink2Description: https://www.silabs.com/documents/public/data-sheets/Si7021-A20.pdf?src-supplier=Newark; ComponentLink3URL: https://www.silabs.com/Support%20Documents%2fTechnicalDocs%2fSi7021-A20.pdf?src-supplier=Digi-Key; ComponentLink3Description: https://www.silabs.com/Support%20Documents%2fTechnicalDocs%2fSi7021-A20.pdf?src-supplier=Digi-Key; ComponentLink4URL: https://www.silabs.com/Support%20Documents/TechnicalDocs/Si7021-A20.pdf?src-supplier=Avnet+Asia; ComponentLink4Description: https://www.silabs.com/Support%20Documents/TechnicalDocs/Si7021-A20.pdf?src-supplier=Avnet+Asia; ComponentLink5URL: https://www.silabs.com/documents/public/data-sheets/Si7021-A20.pdf?src-supplier=Digi-Key; ComponentLink5Description: https://www.silabs.com/documents/public/data-sheets/Si7021-A20.pdf?src-supplier=Digi-Key; ComponentLink6URL: https://www.silabs.com/documents/public/data-sheets/Si7021-A20.pdf?src-supplier=Farnell; ComponentLink6Description: https://www.silabs.com/documents/public/data-sheets/Si7021-A20.pdf?src-supplier=Farnell; Supplier Part Number 1: 336-4380-1-ND; LCSC Part Number: C132603
footprint 6-DFN (3x3)
pins: 1 SDA, 2 GND, 3 DNC, 4 DNC, 5 VDD, 6 SCL, 7 GND

## SPL06-001
designator U?
LGA-8(2x2.5) Pressure Sensors ROHS; Manufacturer: Goertek; Manufacturer Part Number: SPL06-001; Item Type: Sensor; Package: LGA-8(2x2.5); LCSC Part Number: C2684428
footprint SPL06-001
pins: 1 GND, 2 CSB, 3 SDA, 4 SCK, 5 SDO, 6 VDDIO, 7 GND, 8 VDD

## TEPT4400
designator LED?
T-1 Ambient Light Sensors ROHS; Manufacturer: Vishay; Manufacturer Part Number: TEPT4400; Package: Custom; ComponentLink1Description: LCSC; ComponentLink1URL: https://lcsc.com/product-detail/Ambient-Light-Sensors_Vishay-Intertech-TEPT4400_C132178.html; LCSC Part Number: C132178
footprint TEPT4400_
pins: 1 E, 2 C

## TLE5012BE1000
designator U?
SENSOR ANGLE 360DEG SMD; Manufacturer: Infineon; Manufacturer Part Number: TLE5012BE1000; Interface: SPI; Item Type: Magnetic Sensor; Supplier 1: RSComponents; RoHS: Yes; Category: Magnetic Sensors; Stock 1: 1; Pricing 1: 10=6.13600, 100=5.33500, 250=5.04900, 500=4.90100, 1000=4.77700 (USD); Case/Package: SOIC; Number of Pins: 8; Package Quantity: 2500; Packaging: Tape and Reel; RoHS Compliant: Yes; REACH SVHC: No SVHC; Supplier Part Number 1: 1702338; LCSC Part Number: C123083
footprint PG-DSO-8
pins: 1 IFC, 2 SCK, 3 CSQ, 4 DATA, 5 IFA, 6 VDD, 7 GND, 8 IFB

## TLE5012BE5000FUMA1
designator U?
MAGNETIC ANGLE SENSOR; Manufacturer: Infineon; Manufacturer Part Number: TLE5012BE5000; Interface: SPI,PWM; Supplier 1: RSComponents; RoHS: Yes; Category: Magnetic Sensors; Number of Pins: 8; Series: TLE5012; Package Quantity: 2500; Packaging: Tape and Reel; RoHS Compliant: Yes; ComponentLink1URL: http://www.mouser.com/ds/2/196/Infineon-TLE5012B_Exxxx-DS-v02_00-en-540142.pdf?src-supplier=Mouser; ComponentLink1Description: http://www.mouser.com/ds/2/196/Infineon-TLE5012B_Exxxx-DS-v02_00-en-540142.pdf?src-supplier=Mouser; Supplier Part Number 1: 2238590
footprint TLE5012BE5000FUMA1
pins: 1 IFC, 2 SCK, 3 CSQ, 4 DATA, 5 IFA, 6 VDD, 7 GND, 8 IFB

## TLI4971-A120T5-U-E0001
designator U?
POSITION&CURRENT SENSORS; Manufacturer: Infineon; Manufacturer Part Number: TLI4971-A120T5-U-E0001; Accuracy: 2.25%; Max Supply Voltage: 3.5V; Min Supply Voltage: 3.1V; Operating Supply Current: 15mA; Sensing Method: 6244SensingMethod; Supplier: Arrow Electronics; LCSC Part Number: C540236; RoHS: Yes; Item Type: Current Sensors; Stock: 5000; Pricing: 2500=2.753 (USD); Height: 1.1mm
footprint TISON-8(8x8)
pins: 1 VDD, 2 GND, 3 VREF, 4 AOUT, 5 OCD1, 6 OCD2, 7 IP-, 8 IP+

## TLV493DA2BWXTMA1
designator U?
XENSIV 3D MAGNETIC HALL SENSOR S; Manufacturer: Infineon Technologies; Manufacturer Part Number: TLV493DA2BWXTMA1; Item Type: IC; Package: WLCSP-5(0.9x1.1); LCSC Part Number: C3715865; ComponentLink1Description: LCSC; ComponentLink1URL: https://www.lcsc.com/product-detail/Linear-Hall-Sensors_Infineon-Technologies-TLV493DA2BWXTMA1_C3715865.html?s_z=n_TLV493DA2BWXTMA1
footprint WLCSP-5(0.9x1.1)
pins: A1 INT#, A3 SDA, B2 SCL, C1 GND, C3 VDD

## TMP75AIDR
designator U?
SENSOR DIGITAL -40C-125C 8SOIC; Manufacturer: Texas Instruments; Manufacturer Part Number: TMP75AIDR; Min Supply Voltage: 2.7V; Max Supply Voltage: 5.5V; Interface: I2C,SMBus,2-Wire; Resolution: 12b; Operating Supply Current: 85uA; Quiescent Current: 50uA; Number of Bits: 12; Output Current: 3mA; Nominal Supply Current: 410uA; Output Voltage: 400mV; Supplier 1: Digi-Key; RoHS: Yes; Category: Integrated Circuits (ICs); Pricing 1: 1=1.20000, 5=1.15200, 10=0.93600, 25=0.80640, 50=0.69840, 100=0.63360, 500=0.53280, 1000=0.50400 (USD); Mount: Surface Mount; Case/Package: SOIC; Number of Pins: 8; Weight: 0.002677oz; Contact Plating: Gold; Min Operating Temperature: -40°C; Max Operating Temperature: 125°C; Packaging: Tape and Reel; Package Quantity: 1; Max Supply Voltage (DC): 5.5V; Min Supply Voltage (DC): 2.7V; Output Type: Digital; Termination: SMD/SMT; Radiation Hardening: No; Lead Free: Lead Free; RoHS Compliant: Yes; REACH SVHC: No SVHC; ComponentLink1URL: https://datasheet.ciiva.com/15098/getdatasheetpartid-313967-15098447.pdf?src-supplier=Verical; ComponentLink1Description: https://datasheet.ciiva.com/15098/getdatasheetpartid-313967-15098447.pdf?src-supplier=Verical; ComponentLink2URL: https://datasheet.ciiva.com/46395/1836472-46395973.pdf?src-supplier=Element14; ComponentLink2Description: https://datasheet.ciiva.com/46395/1836472-46395973.pdf?src-supplier=Element14; ComponentLink3URL: https://datasheet.ciiva.com/2002/tmp175-2002986.pdf?src-supplier=Digi-Key; ComponentLink3Description: https://datasheet.ciiva.com/2002/tmp175-2002986.pdf?src-supplier=Digi-Key; ComponentLink4URL: https://datasheet.ciiva.com/2002/tmp175-2002985.pdf?src-supplier=Digi-Key; ComponentLink4Description: https://datasheet.ciiva.com/2002/tmp175-2002985.pdf?src-supplier=Digi-Key; ComponentLink5URL: https://datasheet.ciiva.com/2002/tmp175-2002987.pdf?src-supplier=Digi-Key; ComponentLink5Description: https://datasheet.ciiva.com/2002/tmp175-2002987.pdf?src-supplier=Digi-Key; ComponentLink6URL: https://datasheet.ciiva.com/1514/1836472-1514144.pdf?src-supplier=Element14; ComponentLink6Description: https://datasheet.ciiva.com/1514/1836472-1514144.pdf?src-supplier=Element14; ComponentLink7URL: https://datasheet.ciiva.com/1514/1836472-1514145.pdf?src-supplier=Element14; ComponentLink7Description: https://datasheet.ciiva.com/1514/1836472-1514145.pdf?src-supplier=Element14; ComponentLink8URL: https://datasheet.ciiva.com/26240/tmp75-26240250.pdf?src-supplier=Avnet+Europe; ComponentLink8Description: https://datasheet.ciiva.com/26240/tmp75-26240250.pdf?src-supplier=Avnet+Europe; Supplier Part Number 1: 296-17838-1-ND; LCSC Part Number: C30389
footprint SOIC-8
pins: 1 SDA, 2 SCL, 3 ALERT, 4 GND, 5 A2, 6 A1, 7 A0, 8 V+

## TMP112AIDRLR
designator U?
SOT-563 TEMPERATURE SENSORS ROHS; Manufacturer: Texas Instruments; Manufacturer Part Number: TMP112AIDRLR; Item Type: IC; Supplier: Arrow Electronics; Supplier Part Number: TMP112AIDRLR; RoHS: Yes; Category: Integrated Circuits (ICs); Stock: 797; Pricing: 1=1.0774, 10=0.9979, 25=0.988, 100=0.9781, 250=0.9757, 500=0.9733 (USD); ComponentLink1URL: https://datasheet.ciiva.com/15098/getdatasheetpartid-189592-15098348.pdf?src-supplier=Verical; ComponentLink1Description: https://datasheet.ciiva.com/15098/getdatasheetpartid-189592-15098348.pdf?src-supplier=Verical; ComponentLink2URL: https://datasheet.ciiva.com/2004/tmp112-2004135.pdf?src-supplier=Digi-Key; ComponentLink2Description: https://datasheet.ciiva.com/2004/tmp112-2004135.pdf?src-supplier=Digi-Key; ComponentLink3URL: https://datasheet.ciiva.com/3278/tmp112-3278379.pdf?src-supplier=Avnet; ComponentLink3Description: https://datasheet.ciiva.com/3278/tmp112-3278379.pdf?src-supplier=Avnet; LCSC Part Number: C28927
footprint SOT-563
pins: 1 SCL, 2 GND, 3 ALERT, 4 ADD0, 5 V+, 6 SDA

## TMP117AIDRVR
designator U?
Temperature Sensor Digital, Local -55°C ~ 150°C 16 b 6-WSON (2x2); Manufacturer: Texas Instruments; Manufacturer Part Number: TMP117AIDRVR; Item Type: IC; Interface: 39,4268,4478Interface; Max Supply Voltage: 5.5V; Min Supply Voltage: 1.8V; Supplier: Mouser; LCSC Part Number: C699536; RoHS: Yes; Stock: 14370; Pricing: 1=4.53, 10=3.95, 50=3.64, 100=3.52, 1000=3.27, 10000=3.04 (USD); Pins: 6NUMBER; Length: 2mm; Width: 2mm; Height: 800um; Thickness: 750um; ComponentLink1URL: http://www.ti.com/lit/gpn/tmp117?src-supplier=Digikey; ComponentLink1Description: http://www.ti.com/lit/gpn/tmp117?src-supplier=Digikey; ComponentLink2URL: http://www.ti.com/lit/ds/symlink/tmp117.pdf?src-supplier=Digikey; ComponentLink2Description: http://www.ti.com/lit/ds/symlink/tmp117.pdf?src-supplier=Digikey
footprint WDFN-6-EP(2x2)
pins: 1 SCL, 2 GND, 3 ALERT, 4 ADD0, 5 V+, 6 SDA, 7 EP

## TMP117AIDRVT
designator U?
WSON-6(2x2) Temperature Sensors ROHS; Manufacturer: Texas Instruments; Manufacturer Part Number: TMP117AIDRVT; Output Type: I2C; Resolution: 16b; Package: WSON-6(2x2); LCSC Part Number: C2871850; Item Type: Temperature Sensor; ComponentLink1Description: LCSC; Supplier: Mouser; Supplier Part Number: 595-TMP117AIDRVT; RoHS: Yes; Category: Integrated Circuits (ICs); Stock: 14532; Pricing: 1=6.97, 10=5.24, 50=5.24, 100=4.61, 1000=4.02, 10000=4.02 (USD); Mounting Technology: Surface Mount; Min Operating Temperature: -55°C; Max Operating Temperature: 150°C; Packaging: Cut Tape; Series: -; RoHS Compliant: Yes; ComponentLink2URL: http://www.ti.com/lit/ds/symlink/tmp117.pdf?src-supplier=Digi-Key; ComponentLink2Description: http://www.ti.com/lit/ds/symlink/tmp117.pdf?src-supplier=Digi-Key; ComponentLink3URL: http://www.ti.com/lit/gpn/tmp117?src-supplier=Digi-Key; ComponentLink3Description: http://www.ti.com/lit/gpn/tmp117?src-supplier=Digi-Key
footprint WSON-6(2x2)
pins: 1 SCL, 2 GND, 3 ALERT, 4 ADD0, 5 V+, 6 SDA, 7 EPAD

## VL53L5CXV0GC/1
designator U?
SENSOR OPTICAL 20-10000CM I2C; Manufacturer: STMicroelectronics; Manufacturer Part Number: VL53L5CXV0GC/1; Description: VCSEL TOF Photoelectric Sensor, 20mm Min, 4000mm Max, 0.4-2.1V, Rectangular, Surface Mount; Item Type: Sensors; Current Rating: 50mA; Max Supply Voltage: 3.3V; Min Supply Voltage: 2.5V; Response Time: 120ns; Sensing Distance: 4m; Supplier: Arrow Electronics; LCSC Part Number: C3178303; RoHS: Compliant; Stock: 50400; Pricing: 3600=4.313 (USD); China RoHS: Compliant; Height: 1.5mm; Length: 6.4mm; Lifecycle Status: Production; Max Operating Temperature: 85°C; Min Operating Temperature: -30°C; Mounting Technology: Surface Mount; REACH SVHC: Yes; Schedule B: 8542390000, 8542390000|8542390000|8542390000|8542390000|8542390000|8542390000|8542390000|8542390000|8542390000|8542390000|8542390000|8542390000|8542390000|8542390000|8542390000|8542390000|8542390000|8542390000|8542390000|8542390000|8542390000|8542390000|8542390000|85
footprint VL53L5CXV0GC/1
pins: A1 I2C_RST, A2 RSVD4, A3 INT, A4 IOVDD, A5 LPn, A6 RSVD1, A7 RSVD2, B1 AVDD, B4 THERMALPAD, B7 AVDD, C1 GND, C2 RSVD6, C3 SDA, C4 SCL, C5 RSVD5, C6 RSVD3, C7 GND

## ZTP-135SR
designator U?
SENSOR ANALOG -20C-100C TO46-4; Manufacturer: Amphenol Thermometrics; Manufacturer Part Number: ZTP-135SR; Item Type: Temperature Sensor Analog; Output Type: Analog Voltage; Response Time: 25ms; Sensing Method: Infrared (IR); Package: TO-46-4; ComponentLink1Description: LCSC; Supplier: Digi-Key; Supplier Part Number: 235-1330-ND; RoHS: No; Category: Temperature and Humidity Sensors; Stock: 13447; Pricing: 1=3.43, 10=2.569, 25=2.2836, 50=2.1692, 100=2.1122, 500=1.76968, 1000=1.65551, 5000=1.54134 (USD); Case/Package: TO-46-4; Min Operating Temperature: -20°C; Max Operating Temperature: 100°C; Packaging: Bulk; Package Quantity: 5000; Series: -; Lead Free: Lead Free; Reach SVHC Compliant: Unknown; ComponentLink2URL: https://datasheet.ciiva.com/29833/aas-920-159d-ztp-135sr-031314-web-29833210.pdf?src-supplier=Digi-Key; ComponentLink2Description: https://datasheet.ciiva.com/29833/aas-920-159d-ztp-135sr-031314-web-29833210.pdf?src-supplier=Digi-Key
footprint TO-46-4 (ZTP-135SR)
pins: 1 THERMOPILE, 2 THERMISTOR, 3 THERMOPILE_GND, 4 THERMISTOR_GND